# Altium footprint library PcbLib.PcbLib: 65 footprints (part 3 of 5)
Each footprint in its own frame and in the unit in brackets; x right, y up, seen from the top. Pads: shape width x height; smd on the part's side, far side on the other; paste and mask are expansions set on the pad; w line width, h text height; cw(c..) or ccw(c..) is an arc to the next point about the centre after c.
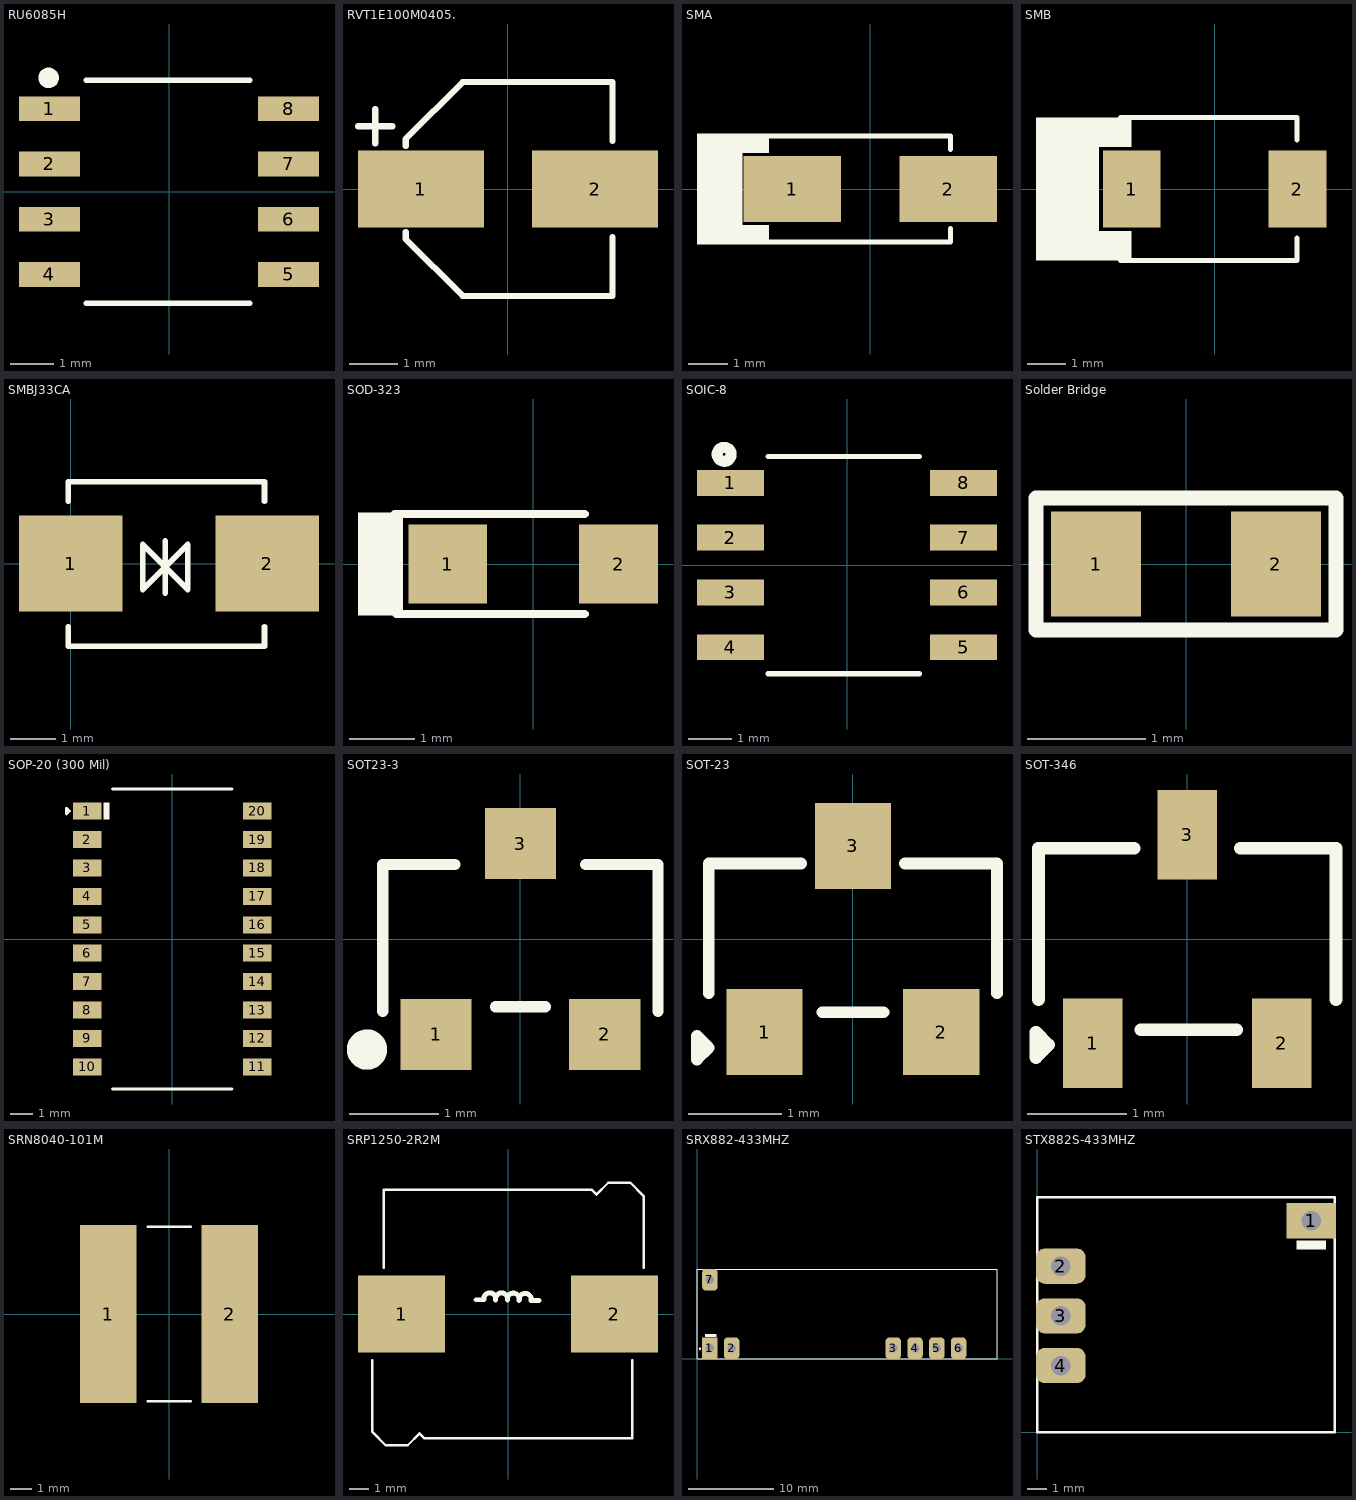
[diagram p2: the footprints below, top view; thin cyan lines are the x and y axes]

## RU6085H [mm]
pads (8):
  rect 1.4x0.57 smd: 1(-2.75,1.905) 2(-2.75,0.635) 3(-2.75,-0.635) 4(-2.75,-1.905) 5(2.75,-1.905) 6(2.75,-0.635) 7(2.75,0.635) 8(2.75,1.905)
Top Overlay:
  circle w0.254: c-2.769,2.616 r0.108
  lines w0.127: -1.905,-2.565 1.854,-2.565 ; -1.905,2.565 1.854,2.565
3D body "SOP8_ROM.step": height 1.5, standoff 0, extent -3.099,-2.502 3.099,2.502

## RVT1E100M0405. [mm] "10uF 25V 5.4mm SMD"
pads (2):
  rect 2.6x1.6 smd: 1(-1.8,0) 2(1.8,0)
Top Overlay:
  lines w0.127: -3.099,1.295 -2.388,1.295 ; -2.743,0.94 -2.743,1.651 ; -2.115,-0.889 -2.115,-1.035 -0.94,-2.21 2.159,-2.21 2.159,-0.991 ; -2.115,0.889 -2.115,1.035 -0.94,2.21 2.159,2.21 2.159,0.991
3D body "roqangrvt1e100m0405.stp": height 3.95, standoff -0.05, extent -2.65,-2.15 2.65,2.15

## SMA [mm]
pads (2):
  rect 2.5x1.7 smd: 1(-2,0) 2(2,0)
Top Overlay:
  rectangle: -3.3,0.924 -2.596,1.422
  rectangle: -4.445,-1.422 -3.278,1.422
  rectangle: -3.3,-1.422 -2.596,-0.924
  lines w0.127: -2.658,-1.358 2.061,-1.358 2.061,-1.012 ; -2.658,1.358 2.061,1.358 2.061,1.012
3D body "User Library-DO-214AC SMA.step": height 2.4, standoff 0, extent -2.6,-1.3 2.6,1.3

## SMB [mm]
pads (2):
  rect 1.5x2 smd: 1(-2.15,0) 2(2.15,0)
Top Overlay:
  rectangle: -3.048,-1.854 -2.159,-1.092
  rectangle: -3.048,1.092 -2.159,1.854
  rectangle: -4.635,-1.854 -2.997,1.854
  lines w0.127: -2.438,-1.854 2.134,-1.854 2.134,-1.27 ; -2.438,1.854 2.134,1.854 2.134,1.27
3D body "User Library-DO-214AA SMB.STEP": height 2.3, standoff 0, extent -2.7,-1.8 2.7,1.8

## SMBJ33CA [mm] "11.3A 53.3V 36.7V 33V Bi-Directional SMB(DO-214AA) TVS ROHS"
pads (2):
  rect 2.28x2.12 smd: 1(0,0) 2(4.33,0)
Top Overlay:
  lines w0.127: -0.054,-1.389 -0.054,-1.822 4.271,-1.822 4.271,-1.389 ; -0.054,1.371 -0.054,1.803 4.271,1.803 4.271,1.371 ; 2.083,-0.648 2.083,0.495 ; 2.083,-0.076 2.578,-0.572 2.578,0.419 2.083,-0.076 ; 2.083,-0.076 1.587,-0.572 1.587,0.419 2.083,-0.076
3D body "1SMB5931H.STEP": height 2.65, standoff 0, extent -0.587,-1.762 4.753,1.863

## SOD-323 [mm]
pads (2):
  rect 1.2x1.2 smd: 1(-1.3,0) 2(1.3,0)
Top Overlay:
  rectangle: -2.667,-0.787 -1.981,0.787
  lines w0.127: -2.108,0.762 0.787,0.762 ; -2.083,-0.762 0.787,-0.762
3D body "User Library-SOD323-1.step": height 1.1, standoff 0, extent -1.3,-0.675 1.3,0.675

## SOIC-8 [mm]
pads (8):
  rect 1.55x0.6 smd: 1(-2.7,1.905) 2(-2.7,0.635) 3(-2.7,-0.635) 4(-2.7,-1.905) 5(2.7,-1.905) 6(2.7,-0.635) 7(2.7,0.635) 8(2.7,1.905)
Top Overlay:
  circle w0.254: c-2.845,2.565 r0.163
  lines w0.127: -1.829,-2.515 1.676,-2.515 ; -1.829,2.515 1.676,2.515
3D body "User Library-SOIC-8-1.STEP": height 1.7, standoff -0.05, extent -3,-2.45 3,2.45

## Solder Bridge [mil] "Solder Bridge ON"
pads (2):
  rect 30x35 smd: 1(-30,0) 2(30,0)
Top Overlay:
  lines w5: -50,-22 -50,22 50,22 50,-22 -50,-22

## SOP-20 (300 Mil) [mm]
pads (20):
  rect 1.27x0.76 smd: 1(-3.8,5.715) 2(-3.8,4.445) 3(-3.8,3.175) 4(-3.8,1.905) 5(-3.8,0.635) 6(-3.8,-0.635) 7(-3.8,-1.905) 8(-3.8,-3.175) 9(-3.8,-4.445) 10(-3.8,-5.715) 11(3.8,-5.715) 12(3.8,-4.445) 13(3.8,-3.175) 14(3.8,-1.905) 15(3.8,-0.635) 16(3.8,0.635) 17(3.8,1.905) 18(3.8,3.175) 19(3.8,4.445) 20(3.8,5.715)
Top Overlay:
  rectangle: -3.073,5.334 -2.794,6.096
  lines w0.127: -2.667,-6.706 2.667,-6.706 ; -2.667,6.706 2.667,6.706 ; -4.724,5.588 -4.597,5.715 -4.724,5.842 -4.724,5.588
3D body "SOP20.STEP": height 1.6, standoff 0, extent -3.9,-6.65 3.9,6.65

## SOT23-3 [mm] "SOT23, 3-Leads, Body 2.9x1.3mm, Pitch 0.95mm, Lead Span 2.3mm - Reverse Pinning, IPC High Density"
height 1.1
pads (3):
  rect 0.8x0.8 smd: 1(-0.95,-1.075) 2(0.95,-1.075) 3(0,1.075)
Top Overlay:
  circle w0.25: c-1.727,-1.245 r0.101
  lines w0.127: -1.55,-0.813 -1.55,0.838 -0.737,0.838 ; -0.28,-0.762 0.279,-0.762 ; 0.736,0.838 1.549,0.838 1.549,-0.813
3D body "CircuitWorks-SOT-23.step": height 1.08, standoff -0.02, extent -1.5,-1.25 1.5,1.25

## SOT-23 [mm] "TRANS NPN 40V 0.6A SOT23"
pads (3):
  rect 0.82x0.92 smd: 1(-0.95,-1) 2(0.95,-1) 3(0,1)
Top Overlay:
  lines w0.127: -1.549,-0.584 -1.549,0.813 -0.559,0.813 ; -0.33,-0.787 0.33,-0.787 ; 0.559,0.813 1.549,0.813 1.549,-0.584 ; -1.676,-1.295 -1.549,-1.168 -1.676,-1.041 -1.676,-1.295
3D body "CircuitWorks-SOT-23.step": height 1.05, standoff -0.05, extent -1.5,-1.25 1.5,1.25

## SOT-346 [mm]
pads (3):
  rect 0.6x0.9 smd: 1(-0.95,-1.05) 2(0.95,-1.05) 3(0,1.05)
Top Overlay:
  lines w0.127: -1.499,-0.61 -1.499,0.914 -0.533,0.914 ; -0.467,-0.914 0.498,-0.914 ; 0.533,0.914 1.499,0.914 1.499,-0.61 ; -1.524,-1.194 -1.524,-0.94 -1.397,-1.067 -1.524,-1.194
3D body "TRANS_2SB852K_ROM.step": height 1.3, standoff 0, extent -1.448,-1.397 1.448,1.397

## SRN8040-101M [mm]
pads (2):
  rect 2.6x8.2 smd: 1(-2.8,0) 2(2.8,0)
Top Overlay:
  lines w0.127: -0.965,-4.013 0.991,-4.013 ; -0.965,4.013 0.991,4.013
3D body "srn8040.stp": height 3.95, standoff 0, extent -4.075,-3.95 4.075,3.95

## SRP1250-2R2M [mm]
pads (2):
  rect 4.5x4 smd: 1(-5.5,0) 2(5.5,0)
Top Overlay:
  lines w0.127: -7.01,-2.388 -7.01,-6.096 -6.325,-6.782 -5.182,-6.782 -4.572,-6.172 -4.318,-6.426 6.426,-6.426 6.426,-2.388 ; -6.426,2.388 -6.426,6.426 4.318,6.426 4.572,6.172 5.182,6.782 6.325,6.782 7.01,6.096 7.01,2.388
  lines w0.254: -1.651,0.737 -1.245,0.737 cw(c-0.94,0.787) -0.637,0.727 cw(c-0.332,0.778) -0.029,0.717 cw(c0.276,0.768) 0.579,0.707 cw(c0.884,0.758) 1.187,0.697 1.6,0.697
3D body "srp1250.stp": height 5.7, standoff -0.2, extent -6.95,-6.75 6.95,6.75

## SRX882-433MHZ [mm]
pads (7):
  rect 1.8x2.54 hole 1: 1(1.5,1.2)
  rrect50% 1.8x2.54 hole 1: 2(4.04,1.2) 3(22.9,1.2) 4(25.44,1.2) 5(27.98,1.2) 6(30.52,1.2) 7(1.5,9.2)
Top Overlay:
  rectangle: 0.94,2.54 2.286,2.87
  lines w0.1: 0.305,1.016 0.432,1.143 0.305,1.27 0.305,1.016
  lines w0.127: 0,0 35,0 35,10.4 0,10.4 0,0

## STX882S-433MHZ [mm]
pads (4):
  rect 2.54x1.8 hole 1: 1(14,10.8)
  rrect50% 2.54x1.8 hole 1: 2(1.2,8.48) 3(1.2,5.94) 4(1.2,3.4)
Top Overlay:
  rectangle: 13.259,9.322 14.757,9.804
  lines w0.127: 0,0 15.2,0 15.2,12 0,12 0,0